# Altium footprint library WR-TBL_Pluggable Connector_3.81mm.PcbLib: 201 footprints (part 12 of 13)
Each footprint in its own frame and in the unit in brackets; x right, y up, seen from the top. Pads: shape width x height; smd on the part's side, far side on the other; paste and mask are expansions set on the pad; w line width, h text height; cw(c..) or ccw(c..) is an arc to the next point about the centre after c.
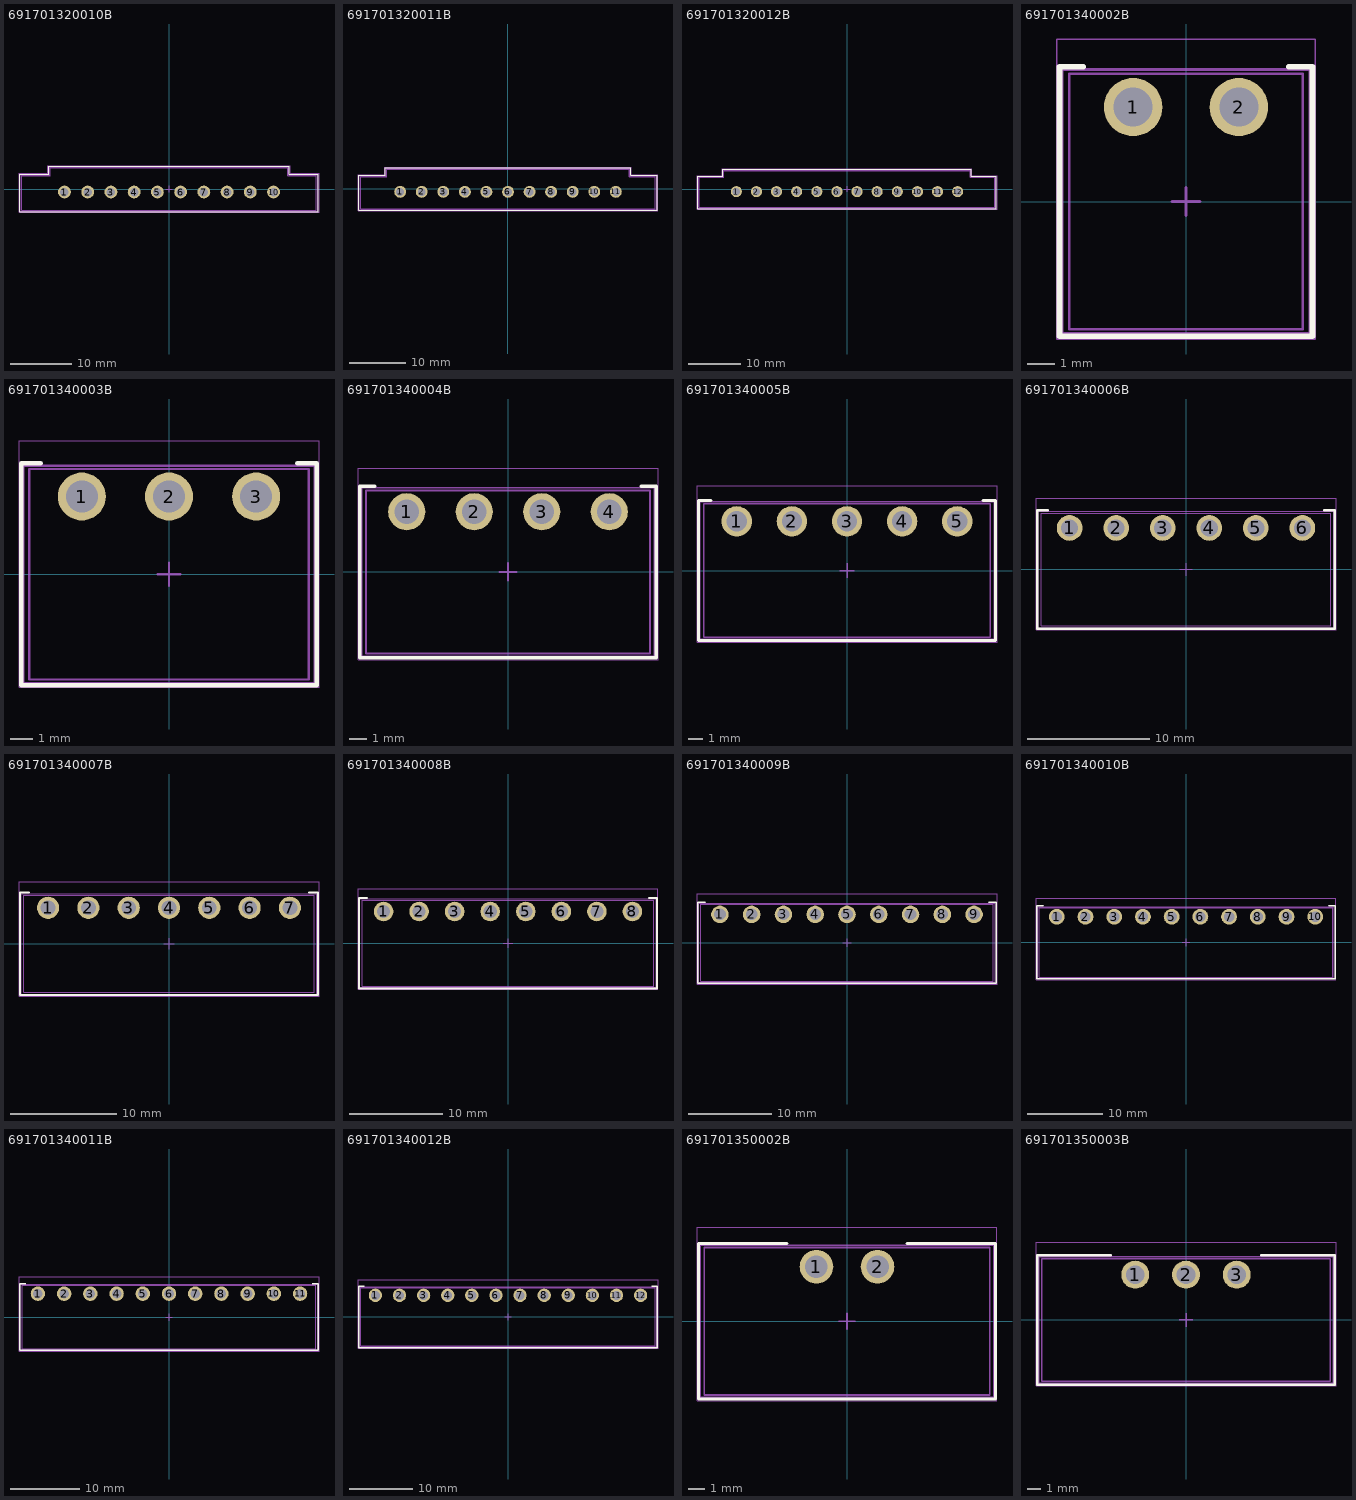
[diagram p11: the footprints below, top view; thin cyan lines are the x and y axes]

## 691701320010B [mm] "THR - 3,81mm - PCB Vertical Flange - 10p"
height 9.2
pads (10):
  round 2.1 hole 1.4: 1(-17.145,-0.5) 2(-13.335,-0.5) 3(-9.525,-0.5) 4(-5.715,-0.5) 5(-1.905,-0.5) 6(1.905,-0.5) 7(5.715,-0.5) 8(9.525,-0.5) 9(13.335,-0.5) 10(17.145,-0.5)
Top Overlay:
  lines w0.2: -24.495,-3.75 -24.495,2.45 -19.74,2.45 -19.74,3.75 19.74,3.75 19.74,2.45 24.495,2.45 24.495,-3.75 -24.495,-3.75
Top Paste:
  region: 11.785,1.75 14.885,1.75 14.885,-2.75 11.785,-2.75
  region: 7.975,1.75 11.075,1.75 11.075,-2.75 7.975,-2.75
  region: 4.165,1.75 7.265,1.75 7.265,-2.75 4.165,-2.75
  region: 0.355,1.75 3.455,1.75 3.455,-2.75 0.355,-2.75
  region: -3.455,1.75 -0.355,1.75 -0.355,-2.75 -3.455,-2.75
  region: -18.695,1.75 -15.595,1.75 -15.595,-2.75 -18.695,-2.75
  region: -14.885,1.75 -11.785,1.75 -11.785,-2.75 -14.885,-2.75
  region: -11.075,1.75 -7.975,1.75 -7.975,-2.75 -11.075,-2.75
  region: -7.265,1.75 -4.165,1.75 -4.165,-2.75 -7.265,-2.75
  region: 15.595,1.75 18.695,1.75 18.695,-2.75 15.595,-2.75
Assembly Notes:
  text "Stencil thickness : 120 μm" at -5.156,-4.601 h1
Top Assembly:
  lines w0.1: -24.395,-3.65 -24.395,2.35 -19.64,2.35 -19.64,3.65 19.64,3.65 19.64,2.35 24.395,2.35 24.395,-3.65 -24.395,-3.65
Top Designator:
  text ".Designator" at -3.647,-0.357 h1
Top 3D Body:
  lines w0.1: -24.145,-3.5 -24.145,2.2 -19.49,2.2 -19.49,3.5 19.49,3.5 19.49,2.2 24.145,2.2 24.145,-3.5 -24.145,-3.5
Top Courtyard:
  lines w0.05: -24.595,-3.85 24.595,-3.85 24.595,2.55 19.84,2.55 19.84,3.85 -19.84,3.85 -19.84,2.55 -24.595,2.55 -24.595,-3.85
Top Component Center:
  lines w0.1: -0.5,0 0.5,0 ; 0,-0.5 0,0.5
3D body "691701320010B.stp": height 9.26, standoff -2.55, extent -24.145,-3.5 24.145,3.5

## 691701320011B [mm] "THR - 3,81mm - PCB Vertical Flange - 11p"
height 9.2
pads (11):
  round 2.1 hole 1.4: 1(-19.05,-0.5) 2(-15.24,-0.5) 3(-11.43,-0.5) 4(-7.62,-0.5) 5(-3.81,-0.5) 6(0,-0.5) 7(3.81,-0.5) 8(7.62,-0.5) 9(11.43,-0.5) 10(15.24,-0.5) 11(19.05,-0.5)
Top Overlay:
  lines w0.2: -26.4,-3.75 -26.4,2.45 -21.645,2.45 -21.645,3.75 21.645,3.75 21.645,2.45 26.4,2.45 26.4,-3.75 -26.4,-3.75
Top Paste:
  region: 9.88,1.75 12.98,1.75 12.98,-2.75 9.88,-2.75
  region: 6.07,1.75 9.17,1.75 9.17,-2.75 6.07,-2.75
  region: 2.26,1.75 5.36,1.75 5.36,-2.75 2.26,-2.75
  region: -1.55,1.75 1.55,1.75 1.55,-2.75 -1.55,-2.75
  region: -5.36,1.75 -2.26,1.75 -2.26,-2.75 -5.36,-2.75
  region: -20.6,1.75 -17.5,1.75 -17.5,-2.75 -20.6,-2.75
  region: -16.79,1.75 -13.69,1.75 -13.69,-2.75 -16.79,-2.75
  region: -12.98,1.75 -9.88,1.75 -9.88,-2.75 -12.98,-2.75
  region: -9.17,1.75 -6.07,1.75 -6.07,-2.75 -9.17,-2.75
  region: 13.69,1.75 16.79,1.75 16.79,-2.75 13.69,-2.75
  region: 17.5,1.75 20.6,1.75 20.6,-2.75 17.5,-2.75
Assembly Notes:
  text "Stencil thickness : 120 μm" at -5.156,-4.601 h1
Top Assembly:
  lines w0.1: -26.3,-3.65 -26.3,2.35 -21.545,2.35 -21.545,3.65 21.545,3.65 21.545,2.35 26.3,2.35 26.3,-3.65 -26.3,-3.65
Top Designator:
  text ".Designator" at -3.647,-0.357 h1
Top 3D Body:
  lines w0.1: -26.05,-3.5 -26.05,2.2 -21.395,2.2 -21.395,3.5 21.395,3.5 21.395,2.2 26.05,2.2 26.05,-3.5 -26.05,-3.5
Top Courtyard:
  lines w0.05: -26.5,-3.85 26.5,-3.85 26.5,2.55 21.745,2.55 21.745,3.85 -21.745,3.85 -21.745,2.55 -26.5,2.55 -26.5,-3.85
Top Component Center:
  lines w0.1: -0.5,0 0.5,0 ; 0,-0.5 0,0.5
3D body "691701320011B.stp": height 9.26, standoff -2.55, extent -26.05,-3.5 26.05,3.5

## 691701320012B [mm] "THR - 3,81mm - PCB Vertical Flange - 12p"
height 9.2
pads (12):
  round 2.1 hole 1.4: 1(-20.955,-0.5) 2(-17.145,-0.5) 3(-13.335,-0.5) 4(-9.525,-0.5) 5(-5.715,-0.5) 6(-1.905,-0.5) 7(1.905,-0.5) 8(5.715,-0.5) 9(9.525,-0.5) 10(13.335,-0.5) 11(17.145,-0.5) 12(20.955,-0.5)
Top Overlay:
  lines w0.2: -28.305,-3.75 -28.305,2.45 -23.55,2.45 -23.55,3.75 23.55,3.75 23.55,2.45 28.305,2.45 28.305,-3.75 -28.305,-3.75
Top Paste:
  region: 7.975,1.75 11.075,1.75 11.075,-2.75 7.975,-2.75
  region: 4.165,1.75 7.265,1.75 7.265,-2.75 4.165,-2.75
  region: 0.355,1.75 3.455,1.75 3.455,-2.75 0.355,-2.75
  region: -3.455,1.75 -0.355,1.75 -0.355,-2.75 -3.455,-2.75
  region: -7.265,1.75 -4.165,1.75 -4.165,-2.75 -7.265,-2.75
  region: -22.505,1.75 -19.405,1.75 -19.405,-2.75 -22.505,-2.75
  region: -18.695,1.75 -15.595,1.75 -15.595,-2.75 -18.695,-2.75
  region: -14.885,1.75 -11.785,1.75 -11.785,-2.75 -14.885,-2.75
  region: -11.075,1.75 -7.975,1.75 -7.975,-2.75 -11.075,-2.75
  region: 11.785,1.75 14.885,1.75 14.885,-2.75 11.785,-2.75
  region: 15.595,1.75 18.695,1.75 18.695,-2.75 15.595,-2.75
  region: 19.405,1.75 22.505,1.75 22.505,-2.75 19.405,-2.75
Assembly Notes:
  text "Stencil thickness : 120 μm" at -5.156,-4.601 h1
Top Assembly:
  lines w0.1: -28.205,-3.65 -28.205,2.35 -23.45,2.35 -23.45,3.65 23.45,3.65 23.45,2.35 28.205,2.35 28.205,-3.65 -28.205,-3.65
Top Designator:
  text ".Designator" at -3.647,-0.357 h1
Top 3D Body:
  lines w0.1: -27.955,-3.5 -27.955,2.2 -23.3,2.2 -23.3,3.5 23.3,3.5 23.3,2.2 27.955,2.2 27.955,-3.5 -27.955,-3.5
Top Courtyard:
  lines w0.05: -28.405,-3.85 28.405,-3.85 28.405,2.55 23.65,2.55 23.65,3.85 -23.65,3.85 -23.65,2.55 -28.405,2.55 -28.405,-3.85
Top Component Center:
  lines w0.1: -0.5,0 0.5,0 ; 0,-0.5 0,0.5
3D body "691701320012B.stp": height 9.26, standoff -2.55, extent -27.955,-3.5 27.955,3.5

## 691701340002B [mm] "Horizontal PCB Header THR Type, pitch 3.81mm, 02p"
height 7.3
pads (2):
  round 2.1 hole 1.4: 1(-1.905,3.4) 2(1.905,3.4)
Top Overlay:
  lines w0.2: -3.7,4.85 -4.555,4.85 -4.555,-4.85 4.555,-4.85 4.555,4.85 3.7,4.85
Top Paste:
  region: 0.355,5.65 3.455,5.65 3.455,1.15 0.355,1.15
  region: -3.455,5.65 -0.355,5.65 -0.355,1.15 -3.455,1.15
Assembly Notes:
  text "Stencil thickness : 120 μm" at -5.156,-5.651 h1
Top Assembly:
  lines w0.1: -4.455,-4.75 4.455,-4.75 4.455,4.75 -4.455,4.75 -4.455,-4.75
Top Designator:
  text ".Designator" at -3.647,-0.357 h1
Top 3D Body:
  lines w0.1: -4.205,-4.6 -4.205,4.6 4.205,4.6 4.205,-4.6 -4.205,-4.6
Top Courtyard:
  lines w0.05: -4.655,-4.95 -4.655,5.85 4.655,5.85 4.655,-4.95 -4.655,-4.95
Top Component Center:
  lines w0.1: -0.5,0 0.5,0 ; 0,-0.5 0,0.5
3D body "691701340002B.stp": height 7.05, standoff -2.55, extent -4.405,-4.6 4.405,4.6

## 691701340003B [mm] "Horizontal PCB Header THR Type, pitch 3.81mm, 03p"
height 7.3
pads (3):
  round 2.1 hole 1.4: 1(-3.81,3.4) 2(0,3.4) 3(3.81,3.4)
Top Overlay:
  lines w0.2: -5.605,4.85 -6.46,4.85 -6.46,-4.85 6.46,-4.85 6.46,4.85 5.605,4.85
Top Paste:
  region: 2.26,5.65 5.36,5.65 5.36,1.15 2.26,1.15
  region: -5.36,5.65 -2.26,5.65 -2.26,1.15 -5.36,1.15
  region: -1.55,5.65 1.55,5.65 1.55,1.15 -1.55,1.15
Assembly Notes:
  text "Stencil thickness : 120 μm" at -5.156,-5.651 h1
Top Assembly:
  lines w0.1: -6.36,-4.75 -6.36,4.75 6.36,4.75 6.36,-4.75 -6.36,-4.75
Top Designator:
  text ".Designator" at -3.647,-0.357 h1
Top 3D Body:
  lines w0.1: -6.11,-4.6 6.11,-4.6 6.11,4.6 -6.11,4.6 -6.11,-4.6
Top Courtyard:
  lines w0.05: -6.56,-4.95 6.56,-4.95 6.56,5.85 -6.56,5.85 -6.56,-4.95
Top Component Center:
  lines w0.1: -0.5,0 0.5,0 ; 0,-0.5 0,0.5
3D body "691701340003B.stp": height 7.05, standoff -2.55, extent -6.31,-4.6 6.31,4.6

## 691701340004B [mm] "Horizontal PCB Header THR Type, pitch 3.81mm, 04p"
height 7.3
pads (4):
  round 2.1 hole 1.4: 1(-5.715,3.4) 2(-1.905,3.4) 3(1.905,3.4) 4(5.715,3.4)
Top Overlay:
  lines w0.2: -7.51,4.85 -8.365,4.85 -8.365,-4.85 8.365,-4.85 8.365,4.85 7.51,4.85
Top Paste:
  region: 4.165,5.65 7.265,5.65 7.265,1.15 4.165,1.15
  region: 0.355,5.65 3.455,5.65 3.455,1.15 0.355,1.15
  region: -7.265,5.65 -4.165,5.65 -4.165,1.15 -7.265,1.15
  region: -3.455,5.65 -0.355,5.65 -0.355,1.15 -3.455,1.15
Assembly Notes:
  text "Stencil thickness : 120 μm" at -5.156,-5.651 h1
Top Assembly:
  lines w0.1: -8.265,-4.75 -8.265,4.75 8.265,4.75 8.265,-4.75 -8.265,-4.75
Top Designator:
  text ".Designator" at -3.647,-0.357 h1
Top 3D Body:
  lines w0.1: -8.015,-4.6 8.015,-4.6 8.015,4.6 -8.015,4.6 -8.015,-4.6
Top Courtyard:
  lines w0.05: -8.465,-4.95 8.465,-4.95 8.465,5.85 -8.465,5.85 -8.465,-4.95
Top Component Center:
  lines w0.1: -0.5,0 0.5,0 ; 0,-0.5 0,0.5
3D body "691701340004B.stp": height 7.05, standoff -2.55, extent -8.215,-4.6 8.215,4.6

## 691701340005B [mm] "Horizontal PCB Header THR Type, pitch 3.81mm, 05p"
height 7.3
pads (5):
  round 2.1 hole 1.4: 1(-7.62,3.4) 2(-3.81,3.4) 3(0,3.4) 4(3.81,3.4) 5(7.62,3.4)
Top Overlay:
  lines w0.2: -9.415,4.85 -10.27,4.85 -10.27,-4.85 10.27,-4.85 10.27,4.85 9.415,4.85
Top Paste:
  region: -5.36,5.65 -2.26,5.65 -2.26,1.15 -5.36,1.15
  region: -9.17,5.65 -6.07,5.65 -6.07,1.15 -9.17,1.15
  region: -1.55,5.65 1.55,5.65 1.55,1.15 -1.55,1.15
  region: 2.26,5.65 5.36,5.65 5.36,1.15 2.26,1.15
  region: 6.07,5.65 9.17,5.65 9.17,1.15 6.07,1.15
Assembly Notes:
  text "Stencil thickness : 120 μm" at -5.156,-5.651 h1
Top Assembly:
  lines w0.1: -10.17,-4.75 10.17,-4.75 10.17,4.75 -10.17,4.75 -10.17,-4.75
Top Designator:
  text ".Designator" at -3.647,-0.357 h1
Top 3D Body:
  lines w0.1: -9.92,-4.6 -9.92,4.6 9.92,4.6 9.92,-4.6 -9.92,-4.6
Top Courtyard:
  lines w0.05: -10.37,-4.95 -10.37,5.85 10.37,5.85 10.37,-4.95 -10.37,-4.95
Top Component Center:
  lines w0.1: -0.5,0 0.5,0 ; 0,-0.5 0,0.5
3D body "691701340005B.stp": height 7.05, standoff -2.55, extent -10.12,-4.6 10.12,4.6

## 691701340006B [mm] "Horizontal PCB Header THR Type, pitch 3.81mm, 06p"
height 7.3
pads (6):
  round 2.1 hole 1.4: 1(-9.525,3.4) 2(-5.715,3.4) 3(-1.905,3.4) 4(1.905,3.4) 5(5.715,3.4) 6(9.525,3.4)
Top Overlay:
  lines w0.2: -11.32,4.85 -12.175,4.85 -12.175,-4.85 12.175,-4.85 12.175,4.85 11.32,4.85
Top Paste:
  region: 7.975,5.65 11.075,5.65 11.075,1.15 7.975,1.15
  region: 4.165,5.65 7.265,5.65 7.265,1.15 4.165,1.15
  region: 0.355,5.65 3.455,5.65 3.455,1.15 0.355,1.15
  region: -3.455,5.65 -0.355,5.65 -0.355,1.15 -3.455,1.15
  region: -11.075,5.65 -7.975,5.65 -7.975,1.15 -11.075,1.15
  region: -7.265,5.65 -4.165,5.65 -4.165,1.15 -7.265,1.15
Assembly Notes:
  text "Stencil thickness : 120 μm" at -5.156,-5.651 h1
Top Assembly:
  lines w0.1: -12.075,-4.75 12.075,-4.75 12.075,4.75 -12.075,4.75 -12.075,-4.75
Top Designator:
  text ".Designator" at -3.647,-0.357 h1
Top 3D Body:
  lines w0.1: -11.825,-4.6 -11.825,4.6 11.825,4.6 11.825,-4.6 -11.825,-4.6
Top Courtyard:
  lines w0.05: -12.275,-4.95 -12.275,5.85 12.275,5.85 12.275,-4.95 -12.275,-4.95
Top Component Center:
  lines w0.1: -0.5,0 0.5,0 ; 0,-0.5 0,0.5
3D body "691701340006B.stp": height 7.05, standoff -2.55, extent -12.025,-4.6 12.025,4.6

## 691701340007B [mm] "Horizontal PCB Header THR Type, pitch 3.81mm, 07p"
height 7.3
pads (7):
  round 2.1 hole 1.4: 1(-11.43,3.4) 2(-7.62,3.4) 3(-3.81,3.4) 4(0,3.4) 5(3.81,3.4) 6(7.62,3.4) 7(11.43,3.4)
Top Overlay:
  lines w0.2: -13.225,4.85 -14.08,4.85 -14.08,-4.85 14.08,-4.85 14.08,4.85 13.225,4.85
Top Paste:
  region: 9.88,5.65 12.98,5.65 12.98,1.15 9.88,1.15
  region: -9.17,5.65 -6.07,5.65 -6.07,1.15 -9.17,1.15
  region: -12.98,5.65 -9.88,5.65 -9.88,1.15 -12.98,1.15
  region: -5.36,5.65 -2.26,5.65 -2.26,1.15 -5.36,1.15
  region: -1.55,5.65 1.55,5.65 1.55,1.15 -1.55,1.15
  region: 2.26,5.65 5.36,5.65 5.36,1.15 2.26,1.15
  region: 6.07,5.65 9.17,5.65 9.17,1.15 6.07,1.15
Assembly Notes:
  text "Stencil thickness : 120 μm" at -5.156,-5.651 h1
Top Assembly:
  lines w0.1: -13.98,-4.75 13.98,-4.75 13.98,4.75 -13.98,4.75 -13.98,-4.75
Top Designator:
  text ".Designator" at -3.647,-0.357 h1
Top 3D Body:
  lines w0.1: -13.73,-4.6 -13.73,4.6 13.73,4.6 13.73,-4.6 -13.73,-4.6
Top Courtyard:
  lines w0.05: -14.18,-4.95 -14.18,5.85 14.18,5.85 14.18,-4.95 -14.18,-4.95
Top Component Center:
  lines w0.1: -0.5,0 0.5,0 ; 0,-0.5 0,0.5
3D body "691701340007B.stp": height 7.05, standoff -2.55, extent -13.93,-4.6 13.93,4.6

## 691701340008B [mm] "Horizontal PCB Header THR Type, pitch 3.81mm, 08p"
height 7.3
pads (8):
  round 2.1 hole 1.4: 1(-13.335,3.4) 2(-9.525,3.4) 3(-5.715,3.4) 4(-1.905,3.4) 5(1.905,3.4) 6(5.715,3.4) 7(9.525,3.4) 8(13.335,3.4)
Top Overlay:
  lines w0.2: -15.13,4.85 -15.985,4.85 -15.985,-4.85 15.985,-4.85 15.985,4.85 15.13,4.85
Top Paste:
  region: 11.785,5.65 14.885,5.65 14.885,1.15 11.785,1.15
  region: 4.165,5.65 7.265,5.65 7.265,1.15 4.165,1.15
  region: 0.355,5.65 3.455,5.65 3.455,1.15 0.355,1.15
  region: -3.455,5.65 -0.355,5.65 -0.355,1.15 -3.455,1.15
  region: -7.265,5.65 -4.165,5.65 -4.165,1.15 -7.265,1.15
  region: -14.885,5.65 -11.785,5.65 -11.785,1.15 -14.885,1.15
  region: -11.075,5.65 -7.975,5.65 -7.975,1.15 -11.075,1.15
  region: 7.975,5.65 11.075,5.65 11.075,1.15 7.975,1.15
Assembly Notes:
  text "Stencil thickness : 120 μm" at -5.156,-5.651 h1
Top Assembly:
  lines w0.1: -15.885,-4.75 15.885,-4.75 15.885,4.75 -15.885,4.75 -15.885,-4.75
Top Designator:
  text ".Designator" at -3.647,-0.357 h1
Top 3D Body:
  lines w0.1: -15.635,-4.6 -15.635,4.6 15.635,4.6 15.635,-4.6 -15.635,-4.6
Top Courtyard:
  lines w0.05: -16.085,-4.95 -16.085,5.85 16.085,5.85 16.085,-4.95 -16.085,-4.95
Top Component Center:
  lines w0.1: -0.5,0 0.5,0 ; 0,-0.5 0,0.5
3D body "691701340008B.stp": height 7.05, standoff -2.55, extent -15.835,-4.6 15.835,4.6

## 691701340009B [mm] "Horizontal PCB Header THR Type, pitch 3.81mm, 09p"
height 7.3
pads (9):
  round 2.1 hole 1.4: 1(-15.24,3.4) 2(-11.43,3.4) 3(-7.62,3.4) 4(-3.81,3.4) 5(0,3.4) 6(3.81,3.4) 7(7.62,3.4) 8(11.43,3.4) 9(15.24,3.4)
Top Overlay:
  lines w0.2: -17.035,4.85 -17.89,4.85 -17.89,-4.85 17.89,-4.85 17.89,4.85 17.035,4.85
Top Paste:
  region: 13.69,5.65 16.79,5.65 16.79,1.15 13.69,1.15
  region: 6.07,5.65 9.17,5.65 9.17,1.15 6.07,1.15
  region: -12.98,5.65 -9.88,5.65 -9.88,1.15 -12.98,1.15
  region: -16.79,5.65 -13.69,5.65 -13.69,1.15 -16.79,1.15
  region: -9.17,5.65 -6.07,5.65 -6.07,1.15 -9.17,1.15
  region: -5.36,5.65 -2.26,5.65 -2.26,1.15 -5.36,1.15
  region: -1.55,5.65 1.55,5.65 1.55,1.15 -1.55,1.15
  region: 2.26,5.65 5.36,5.65 5.36,1.15 2.26,1.15
  region: 9.88,5.65 12.98,5.65 12.98,1.15 9.88,1.15
Assembly Notes:
  text "Stencil thickness : 120 μm" at -5.156,-5.651 h1
Top Assembly:
  lines w0.1: -17.79,-4.75 17.79,-4.75 17.79,4.75 -17.79,4.75 -17.79,-4.75
Top Designator:
  text ".Designator" at -3.647,-0.357 h1
Top 3D Body:
  lines w0.1: -17.54,-4.6 -17.54,4.6 17.54,4.6 17.54,-4.6 -17.54,-4.6
Top Courtyard:
  lines w0.05: -17.99,-4.95 -17.99,5.85 17.99,5.85 17.99,-4.95 -17.99,-4.95
Top Component Center:
  lines w0.1: -0.5,0 0.5,0 ; 0,-0.5 0,0.5
3D body "691701340009B.stp": height 7.05, standoff -2.55, extent -17.74,-4.6 17.74,4.6

## 691701340010B [mm] "Horizontal PCB Header THR Type, pitch 3.81mm, 10p"
height 7.3
pads (10):
  round 2.1 hole 1.4: 1(-17.145,3.4) 2(-13.335,3.4) 3(-9.525,3.4) 4(-5.715,3.4) 5(-1.905,3.4) 6(1.905,3.4) 7(5.715,3.4) 8(9.525,3.4) 9(13.335,3.4) 10(17.145,3.4)
Top Overlay:
  lines w0.2: -18.94,4.85 -19.795,4.85 -19.795,-4.85 19.795,-4.85 19.795,4.85 18.94,4.85
Top Paste:
  region: 7.975,5.65 11.075,5.65 11.075,1.15 7.975,1.15
  region: 0.355,5.65 3.455,5.65 3.455,1.15 0.355,1.15
  region: -3.455,5.65 -0.355,5.65 -0.355,1.15 -3.455,1.15
  region: -7.265,5.65 -4.165,5.65 -4.165,1.15 -7.265,1.15
  region: -11.075,5.65 -7.975,5.65 -7.975,1.15 -11.075,1.15
  region: -18.695,5.65 -15.595,5.65 -15.595,1.15 -18.695,1.15
  region: -14.885,5.65 -11.785,5.65 -11.785,1.15 -14.885,1.15
  region: 4.165,5.65 7.265,5.65 7.265,1.15 4.165,1.15
  region: 11.785,5.65 14.885,5.65 14.885,1.15 11.785,1.15
  region: 15.595,5.65 18.695,5.65 18.695,1.15 15.595,1.15
Assembly Notes:
  text "Stencil thickness : 120 μm" at -5.156,-5.651 h1
Top Assembly:
  lines w0.1: -19.695,-4.75 19.695,-4.75 19.695,4.75 -19.695,4.75 -19.695,-4.75
Top Designator:
  text ".Designator" at -3.647,-0.357 h1
Top 3D Body:
  lines w0.1: -19.445,-4.6 -19.445,4.6 19.445,4.6 19.445,-4.6 -19.445,-4.6
Top Courtyard:
  lines w0.05: -19.895,-4.95 -19.895,5.85 19.895,5.85 19.895,-4.95 -19.895,-4.95
Top Component Center:
  lines w0.1: -0.5,0 0.5,0 ; 0,-0.5 0,0.5
3D body "691701340010B.stp": height 7.05, standoff -2.55, extent -19.645,-4.6 19.645,4.6

## 691701340011B [mm] "Horizontal PCB Header THR Type, pitch 3.81mm, 11p"
height 7.3
pads (11):
  round 2.1 hole 1.4: 1(-19.05,3.4) 2(-15.24,3.4) 3(-11.43,3.4) 4(-7.62,3.4) 5(-3.81,3.4) 6(0,3.4) 7(3.81,3.4) 8(7.62,3.4) 9(11.43,3.4) 10(15.24,3.4) 11(19.05,3.4)
Top Overlay:
  lines w0.2: -20.845,4.85 -21.7,4.85 -21.7,-4.85 21.7,-4.85 21.7,4.85 20.845,4.85
Top Paste:
  region: 13.69,5.65 16.79,5.65 16.79,1.15 13.69,1.15
  region: 9.88,5.65 12.98,5.65 12.98,1.15 9.88,1.15
  region: 2.26,5.65 5.36,5.65 5.36,1.15 2.26,1.15
  region: -16.79,5.65 -13.69,5.65 -13.69,1.15 -16.79,1.15
  region: -20.6,5.65 -17.5,5.65 -17.5,1.15 -20.6,1.15
  region: -12.98,5.65 -9.88,5.65 -9.88,1.15 -12.98,1.15
  region: -9.17,5.65 -6.07,5.65 -6.07,1.15 -9.17,1.15
  region: -5.36,5.65 -2.26,5.65 -2.26,1.15 -5.36,1.15
  region: -1.55,5.65 1.55,5.65 1.55,1.15 -1.55,1.15
  region: 6.07,5.65 9.17,5.65 9.17,1.15 6.07,1.15
  region: 17.5,5.65 20.6,5.65 20.6,1.15 17.5,1.15
Assembly Notes:
  text "Stencil thickness : 120 μm" at -5.156,-5.651 h1
Top Assembly:
  lines w0.1: -21.6,-4.75 -21.6,4.75 21.6,4.75 21.6,-4.75 -21.6,-4.75
Top Designator:
  text ".Designator" at -3.647,-0.357 h1
Top 3D Body:
  lines w0.1: -21.35,-4.6 21.35,-4.6 21.35,4.6 -21.35,4.6 -21.35,-4.6
Top Courtyard:
  lines w0.05: -21.8,-4.95 21.8,-4.95 21.8,5.85 -21.8,5.85 -21.8,-4.95
Top Component Center:
  lines w0.1: -0.5,0 0.5,0 ; 0,-0.5 0,0.5
3D body "691701340011B.stp": height 7.05, standoff -2.55, extent -21.55,-4.6 21.55,4.6

## 691701340012B [mm] "Horizontal PCB Header THR Type, pitch 3.81mm, 12p"
height 7.3
pads (12):
  round 2.1 hole 1.4: 1(-20.955,3.4) 2(-17.145,3.4) 3(-13.335,3.4) 4(-9.525,3.4) 5(-5.715,3.4) 6(-1.905,3.4) 7(1.905,3.4) 8(5.715,3.4) 9(9.525,3.4) 10(13.335,3.4) 11(17.145,3.4) 12(20.955,3.4)
Top Overlay:
  lines w0.2: -22.75,4.85 -23.605,4.85 -23.605,-4.85 23.605,-4.85 23.605,4.85 22.75,4.85
Top Paste:
  region: 19.405,5.65 22.505,5.65 22.505,1.15 19.405,1.15
  region: 15.595,5.65 18.695,5.65 18.695,1.15 15.595,1.15
  region: 4.165,5.65 7.265,5.65 7.265,1.15 4.165,1.15
  region: -3.455,5.65 -0.355,5.65 -0.355,1.15 -3.455,1.15
  region: -7.265,5.65 -4.165,5.65 -4.165,1.15 -7.265,1.15
  region: -11.075,5.65 -7.975,5.65 -7.975,1.15 -11.075,1.15
  region: -14.885,5.65 -11.785,5.65 -11.785,1.15 -14.885,1.15
  region: -22.505,5.65 -19.405,5.65 -19.405,1.15 -22.505,1.15
  region: -18.695,5.65 -15.595,5.65 -15.595,1.15 -18.695,1.15
  region: 0.355,5.65 3.455,5.65 3.455,1.15 0.355,1.15
  region: 7.975,5.65 11.075,5.65 11.075,1.15 7.975,1.15
  region: 11.785,5.65 14.885,5.65 14.885,1.15 11.785,1.15
Assembly Notes:
  text "Stencil thickness : 120 μm" at -5.156,-5.651 h1
Top Assembly:
  lines w0.1: -23.505,-4.75 -23.505,4.75 23.505,4.75 23.505,-4.75 -23.505,-4.75
Top Designator:
  text ".Designator" at -3.647,-0.357 h1
Top 3D Body:
  lines w0.1: -23.255,-4.6 23.255,-4.6 23.255,4.6 -23.255,4.6 -23.255,-4.6
Top Courtyard:
  lines w0.05: -23.705,-4.95 23.705,-4.95 23.705,5.85 -23.705,5.85 -23.705,-4.95
Top Component Center:
  lines w0.1: -0.5,0 0.5,0 ; 0,-0.5 0,0.5
3D body "691701340012B.stp": height 7.05, standoff -2.55, extent -23.455,-4.6 23.455,4.6

## 691701350002B [mm] "Horizontal PCB Header THR Type with Flanges, pitch 3.81mm, 02p"
height 7.3
pads (2):
  round 2.1 hole 1.4: 1(-1.905,3.4) 2(1.905,3.4)
Top Overlay:
  lines w0.2: -3.75,4.85 -9.255,4.85 -9.255,-4.85 9.255,-4.85 9.255,4.85 3.75,4.85
Top Paste:
  region: -3.455,5.65 -0.355,5.65 -0.355,1.15 -3.455,1.15
  region: 0.355,5.65 3.455,5.65 3.455,1.15 0.355,1.15
Assembly Notes:
  text "Stencil thickness : 120 μm" at -5.156,-5.651 h1
Top Assembly:
  lines w0.1: -9.155,-4.75 -9.155,4.75 9.155,4.75 9.155,-4.75 -9.155,-4.75
Top Designator:
  text ".Designator" at -3.647,-0.357 h1
Top 3D Body:
  lines w0.1: -8.905,-4.6 -8.905,4.6 8.905,4.6 8.905,-4.6 -8.905,-4.6
Top Courtyard:
  lines w0.05: -9.355,-4.95 -9.355,5.85 9.355,5.85 9.355,-4.95 -9.355,-4.95
Top Component Center:
  lines w0.1: -0.5,0 0.5,0 ; 0,-0.5 0,0.5
3D body "691701350002B.stp": height 7.1, standoff -2.5, extent -8.905,-4.61 8.905,4.6

## 691701350003B [mm] "Horizontal PCB Header THR Type with Flanges, pitch 3.81mm, 03p"
height 7.3
pads (3):
  round 2.1 hole 1.4: 1(-3.81,3.4) 2(0,3.4) 3(3.81,3.4)
Top Overlay:
  lines w0.2: -5.655,4.85 -11.16,4.85 -11.16,-4.85 11.16,-4.85 11.16,4.85 5.655,4.85
Top Paste:
  region: 2.26,5.65 5.36,5.65 5.36,1.15 2.26,1.15
  region: -5.36,5.65 -2.26,5.65 -2.26,1.15 -5.36,1.15
  region: -1.55,5.65 1.55,5.65 1.55,1.15 -1.55,1.15
Assembly Notes:
  text "Stencil thickness : 120 μm" at -5.156,-5.651 h1
Top Assembly:
  lines w0.1: -11.06,-4.75 -11.06,4.75 11.06,4.75 11.06,-4.75 -11.06,-4.75
Top Designator:
  text ".Designator" at -3.647,-0.357 h1
Top 3D Body:
  lines w0.1: -10.81,-4.6 -10.81,4.6 10.81,4.6 10.81,-4.6 -10.81,-4.6
Top Courtyard:
  lines w0.05: -11.26,-4.95 -11.26,5.85 11.26,5.85 11.26,-4.95 -11.26,-4.95
Top Component Center:
  lines w0.1: -0.5,0 0.5,0 ; 0,-0.5 0,0.5
3D body "691701350003B.stp": height 7.1, standoff -2.5, extent -10.81,-4.61 10.81,4.6